# Altium footprint library ESP32_HMI1.PcbLib: 33 footprints (part 2 of 3)
Each footprint in its own frame and in the unit in brackets; x right, y up, seen from the top. Pads: shape width x height; smd on the part's side, far side on the other; paste and mask are expansions set on the pad; w line width, h text height; cw(c..) or ccw(c..) is an arc to the next point about the centre after c.
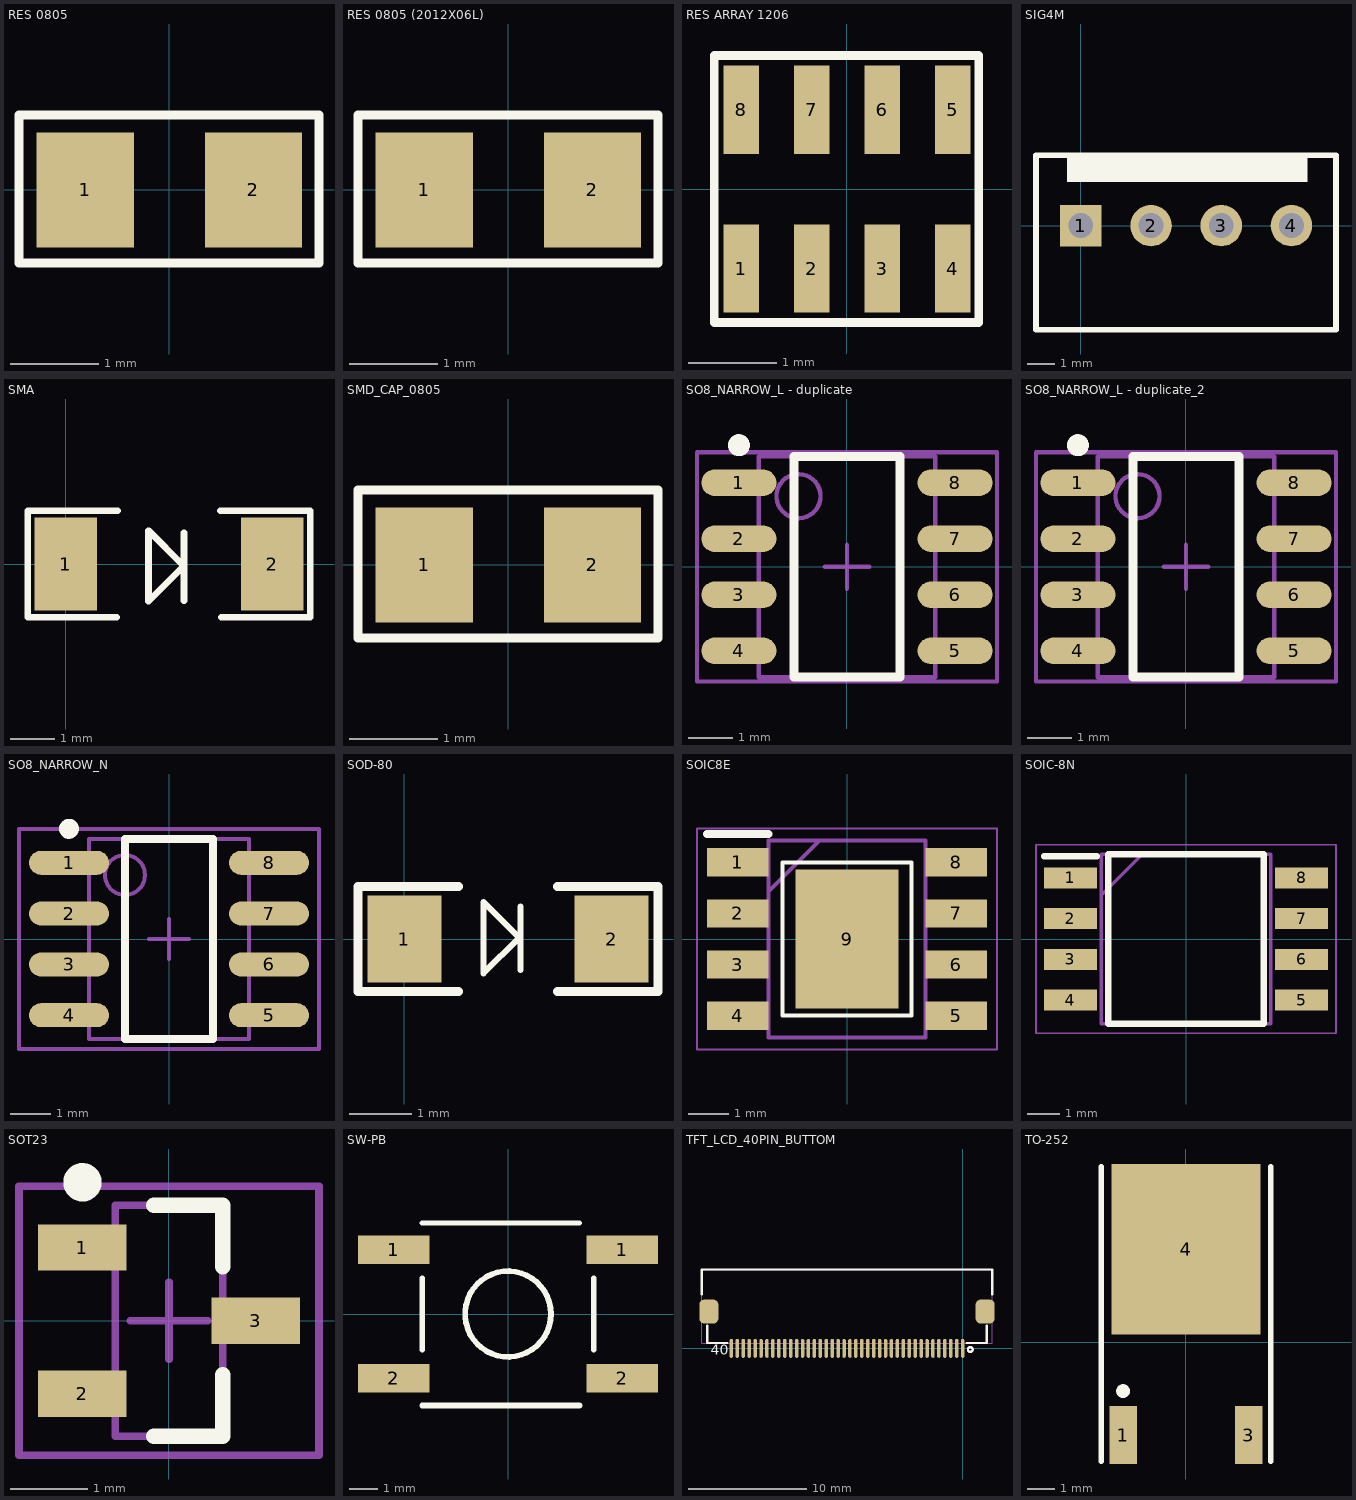
[diagram p1: the footprints below, top view; thin cyan lines are the x and y axes]

## RES 0805 [mm] "Chip Resistor, 2-Leads, Body 2.0x1.3mm, IPC High Density _ (0.100 W)"
height 0.65
pads (2):
  rect 1.1x1.3 smd: 1(-0.95,0) 2(0.95,0)
Top Overlay:
  lines w0.1: -1.7,-0.826 -1.7,0.843 1.691,0.843 1.691,-0.826 -1.7,-0.826
3D body "User Library-res0805.STEP": height 0.53, standoff 0, extent -1.49,-0.702 1.51,0.698

## RES 0805 (2012X06L) [mm] "Chip Resistor, 2-Leads, Body 2.0x1.3mm, IPC High Density _ (0.100 W)"
height 0.65
pads (2):
  rect 1.1x1.3 smd: 1(-0.95,0) 2(0.95,0)
Top Overlay:
  lines w0.1: -1.7,-0.826 1.691,-0.826 1.691,0.843 -1.7,0.843 -1.7,-0.826
3D body "User Library-res0805.STEP": height 0.53, standoff 0, extent -1.49,-0.702 1.51,0.698

## RES ARRAY 1206 [mm]
pads (8):
  rect 0.4x1 smd: 1(-1.2,-0.9) 2(-0.4,-0.9) 3(0.4,-0.9) 4(1.2,-0.9) 5(1.2,0.9) 6(0.4,0.9) 7(-0.4,0.9) 8(-1.2,0.9)
Top Overlay:
  lines w0.1: -1.505,-1.51 -1.505,1.513 1.492,1.513 1.492,-1.51 -1.505,-1.51
3D body "User Library-Array-1206-4Way-Var2-1.STEP": height 0.5, standoff 0, extent -1.6,-0.8 1.6,0.8

## SIG4M [mm]
pads (4):
  rect 1.5x1.5 hole 0.9: 1(0,0)
  round 1.5 hole 0.9: 2(2.54,0) 3(5.08,0) 4(7.62,0)
Top Overlay:
  region: -0.5,2.54 -0.5,1.575 8.2,1.575 8.2,2.54
  lines w0.2: -1.62,-3.76 9.23,-3.76 9.23,2.54 -1.62,2.54 -1.62,-3.76

## SMA [mm]
height 4.58
pads (2):
  rect 1.4x2.1 smd: 1(0,0) 2(4.65,0)
Top Overlay:
  lines w0.15: 1.15,-1.2 -0.85,-1.2 -0.85,1.2 1.175,1.2 ; 2.661,-0.825 2.661,0.7 ; 3.475,1.2 5.5,1.2 5.5,-1.2 3.5,-1.2 ; 1.863,-0.838 1.863,0.75 2.658,-0.044 1.863,-0.838

## SMD_CAP_0805 [mm]
pads (2):
  rect 1.1x1.3 smd: 1(-0.95,0) 2(0.95,0)
Top Overlay:
  lines w0.1: -1.7,-0.826 1.691,-0.826 1.691,0.843 -1.7,0.843 -1.7,-0.826
3D body "SW3dPS-0805 SMD Capacitor.STEP": height 0.78, standoff 0, extent -1,-0.625 1,0.625

## SO8_NARROW_L - duplicate [mm] "8-Pin Small Outline Package (SO8), IPC High Density"
height 1.73
pads (8):
  oval 1.7x0.6 smd: 1(-2.45,1.905) 2(-2.45,0.635) 3(-2.45,-0.635) 4(-2.45,-1.905) 5(2.45,-1.905) 6(2.45,-0.635) 7(2.45,0.635) 8(2.45,1.905)
Top Overlay:
  circle w0.25: c-2.45,2.755 r0.125
  lines w0.2: -1.2,-2.5 1.2,-2.5 1.2,2.5 -1.2,2.5 -1.2,-2.5
Mechanical 13:
  circle w0.1: c-1.1,1.6 r0.5
  lines w0.1: -2,-2.5 2,-2.5 2,2.5 -2,2.5 -2,-2.5
Mechanical 15:
  lines w0.1: -0.5,0 0.5,0 ; 0,-0.5 0,0.5 ; -3.4,-2.6 3.4,-2.6 3.4,2.6 -3.4,2.6 -3.4,-2.6
3D body "SO8_narrow.step": height 1.7, standoff 0, extent -3.124,-2.388 3.073,2.438

## SO8_NARROW_L - duplicate_2 [mm]
pads (8):
  oval 1.7x0.6 smd: 1(-2.45,1.905) 2(-2.45,0.635) 3(-2.45,-0.635) 4(-2.45,-1.905) 5(2.45,-1.905) 6(2.45,-0.635) 7(2.45,0.635) 8(2.45,1.905)
Top Overlay:
  circle w0.25: c-2.45,2.755 r0.125
  lines w0.2: -1.2,-2.5 1.2,-2.5 1.2,2.5 -1.2,2.5 -1.2,-2.5
Mechanical 13:
  circle w0.1: c-1.1,1.6 r0.5
  lines w0.1: -2,-2.5 2,-2.5 2,2.5 -2,2.5 -2,-2.5
Mechanical 15:
  lines w0.1: -0.5,0 0.5,0 ; 0,-0.5 0,0.5 ; -3.4,-2.6 3.4,-2.6 3.4,2.6 -3.4,2.6 -3.4,-2.6
3D body "SO8_narrow.step": height 1.7, standoff 0, extent -3.124,-2.388 3.073,2.438

## SO8_NARROW_N [mm] "8-Pin Small Outline Package (SO8), IPC Medium Density"
height 1.73
pads (8):
  oval 2x0.6 smd: 1(-2.5,1.905) 2(-2.5,0.635) 3(-2.5,-0.635) 4(-2.5,-1.905) 5(2.5,-1.905) 6(2.5,-0.635) 7(2.5,0.635) 8(2.5,1.905)
Top Overlay:
  circle w0.25: c-2.5,2.755 r0.125
  lines w0.2: -1.1,-2.5 -1.1,2.5 1.1,2.5 1.1,-2.5 -1.1,-2.5
Mechanical 13:
  circle w0.1: c-1.1,1.6 r0.5
  lines w0.1: -2,-2.5 -2,2.5 2,2.5 2,-2.5 -2,-2.5
Mechanical 15:
  lines w0.1: -0.5,0 0.5,0 ; 0,-0.5 0,0.5 ; -3.75,-2.75 -3.75,2.75 3.75,2.75 3.75,-2.75 -3.75,-2.75
3D body "SO8_narrow.step": height 1.7, standoff 0, extent -3.124,-2.388 3.073,2.438

## SOD-80 [mm]
height 1.9
pads (2):
  rect 1.2x1.4 smd: 1(0,0) 2(3.35,0)
Top Overlay:
  lines w0.1: 1.875,-0.5 1.875,0.525 ; 1.278,-0.553 1.278,0.6 1.855,0.023 1.278,-0.553
  lines w0.15: 0.875,-0.85 -0.75,-0.85 -0.75,0.85 0.875,0.85 ; 2.475,-0.85 4.1,-0.85 4.1,0.85 2.475,0.85

## SOIC8E [mm]
pads (9):
  rect 1.525x0.7 smd: 1(-2.712,1.905) 2(-2.712,0.635) 3(-2.712,-0.635) 4(-2.712,-1.905) 5(2.712,-1.905) 6(2.712,-0.635) 7(2.712,0.635) 8(2.712,1.905)
  rect 2.56x3.45 smd: 9(0,0)
Top Overlay:
  lines w0.1: -1.6,-1.9 1.6,-1.9 1.6,1.9 -1.6,1.9 -1.6,-1.9
  lines w0.2: -3.475,2.605 -1.95,2.605
Mechanical 13:
  lines w0.1: -1.95,1.18 -0.68,2.45 ; -1.95,-2.45 -1.95,2.45 1.95,2.45 1.95,-2.45 -1.95,-2.45
Mechanical 15:
  lines w0.05: -3.725,-2.75 -3.725,2.75 3.725,2.75 3.725,-2.75 -3.725,-2.75
3D body "MP1584EN-LF.stp": height 1.7, standoff 0, extent -3,-2.45 3,2.45

## SOIC-8N [mm]
pads (8):
  rect 1.65x0.65 smd: 1(-3.6,1.905) 2(-3.6,0.635) 3(-3.6,-0.635) 4(-3.6,-1.905) 5(3.6,-1.905) 6(3.6,-0.635) 7(3.6,0.635) 8(3.6,1.905)
Top Overlay:
  lines w0.2: -4.425,2.58 -2.775,2.58 ; -2.425,-2.64 2.425,-2.64 2.425,2.64 -2.425,2.64 -2.425,-2.64
Mechanical 13:
  lines w0.1: -2.64,1.37 -1.37,2.64 ; -2.64,-2.64 2.64,-2.64 2.64,2.64 -2.64,2.64 -2.64,-2.64
Mechanical 15:
  lines w0.05: -4.675,-2.94 4.675,-2.94 4.675,2.94 -4.675,2.94 -4.675,-2.94
3D body "W25Q16BVSSIG_TR.stp": height 2.16, standoff 0, extent -3.95,-2.64 3.95,2.64

## SOT23 [mm] "SOT23, 3-Leads, Body 2.9x1.3mm, Pitch 0.95mm, Lead Span 2.4mm, IPC Medium Density"
height 1.14
pads (3):
  rect 1.15x0.6 smd: 1(-1.125,0.95) 2(-1.125,-0.95) 3(1.125,0)
Top Overlay:
  circle w0.25: c-1.125,1.8 r0.125
  lines w0.2: -0.2,-1.5 0.7,-1.5 0.7,-0.7 ; -0.2,1.5 0.7,1.5 0.7,0.7
Mechanical 13:
  lines w0.1: -0.7,-1.5 0.7,-1.5 0.7,1.5 -0.7,1.5 -0.7,-1.5
Mechanical 15:
  lines w0.1: -0.5,0 0.5,0 ; 0,-0.5 0,0.5 ; -1.95,-1.75 1.95,-1.75 1.95,1.75 -1.95,1.75 -1.95,-1.75
3D body "User Library-N-MOS_BSS123_SOT23.STEP": height 1, standoff 0, extent -1.225,-1.45 1.075,1.45

## SW-PB [mm]
pads (4):
  rect 2.5x1 smd: 1(-3.992,2.25) 1(3.992,2.25) 2(-3.992,-2.25) 2(3.992,-2.25)
Top Overlay:
  circle w0.2: c0,0 r1.5
  lines w0.178: -2.997,3.175 2.503,3.175
  lines w0.2: -3,-1.25 -3,1.25 ; -2.997,-3.2 2.503,-3.2 ; 3,-1.25 3,1.25
3D body "SW3dPS-switch.STEP": height 5, standoff 0, extent -4.5,-3 4.5,3

## TFT_LCD_40PIN_BUTTOM [mm] "FPC, FH12 Series; 40 Position; 0.5mm, Top Contact"
height 2
pads (42):
  oval 0.3x1.6 smd mask+0.05: 1(0,0) 2(-0.5,0) 3(-1,0) 4(-1.5,0) 5(-2,0) 6(-2.5,0) 7(-3,0) 8(-3.5,0) 9(-4,0) 10(-4.5,0) 11(-5,0) 12(-5.5,0) 13(-6,0) 14(-6.5,0) 15(-7,0) 16(-7.5,0) 17(-8,0) 18(-8.5,0) 19(-9,0) 20(-9.5,0) 21(-10,0) 22(-10.5,0) 23(-11,0) 24(-11.5,0) 25(-12,0) 26(-12.5,0) 27(-13,0) 28(-13.5,0) 29(-14,0) 30(-14.5,0) 31(-15,0) 32(-15.5,0) 33(-16,0) 34(-16.5,0) 35(-17,0) 36(-17.5,0) 37(-18,0) 38(-18.5,0) 39(-19,0) 40(-19.5,0)
  rrect50% 1.6x2 smd: ""(-21.4,3.1) ""(1.9,3.1)
Top Overlay:
  circle w0.2: c0.65,-0.1 r0.2
  lines w0.2: -22,4.57 -22,6.645 2.5,6.645 2.5,4.57 ; -21.55,1.9 -21.55,0.445 -19.85,0.445 ; 0.35,0.445 2.05,0.445 2.05,1.9
  text "40" at -21.25,-0.855 h1.5
Mechanical 13:
  lines w0.1: -22,0.445 2.5,0.445 2.5,6.645 -22,6.645 -22,0.445
3D body "FH12A-40S-0.5SH.stp": height 2.05, standoff -0.1, extent -22,-0.3 2.5,6.7

## TO-252 [mm] "D-PAK/TO-252-AA; 3 Leads (1 Cropped); Body 10.1 (inc. leads) x 6.6 mm (LxW max)"
pads (3):
  rect 1x2.1 smd: 1(-2.285,-3.375) 3(2.285,-3.375)
  rect 5.4x6.2 smd: 4(0,3.375)
Top Overlay:
  circle w0.25: c-2.285,-1.775 r0.125
  lines w0.2: -3.085,-4.325 -3.085,6.375 ; 3.085,-4.325 3.085,6.375
3D body "User Library-DPAK-1.step": height 2.39, standoff -0.02, extent -3.27,-4.111 3.27,5.827